# Altium footprint library MY_LIB_Connectors.PcbLib: 358 footprints (part 18 of 23)
Each footprint in its own frame and in the unit in brackets; x right, y up, seen from the top. Pads: shape width x height; smd on the part's side, far side on the other; paste and mask are expansions set on the pad; w line width, h text height; cw(c..) or ccw(c..) is an arc to the next point about the centre after c.
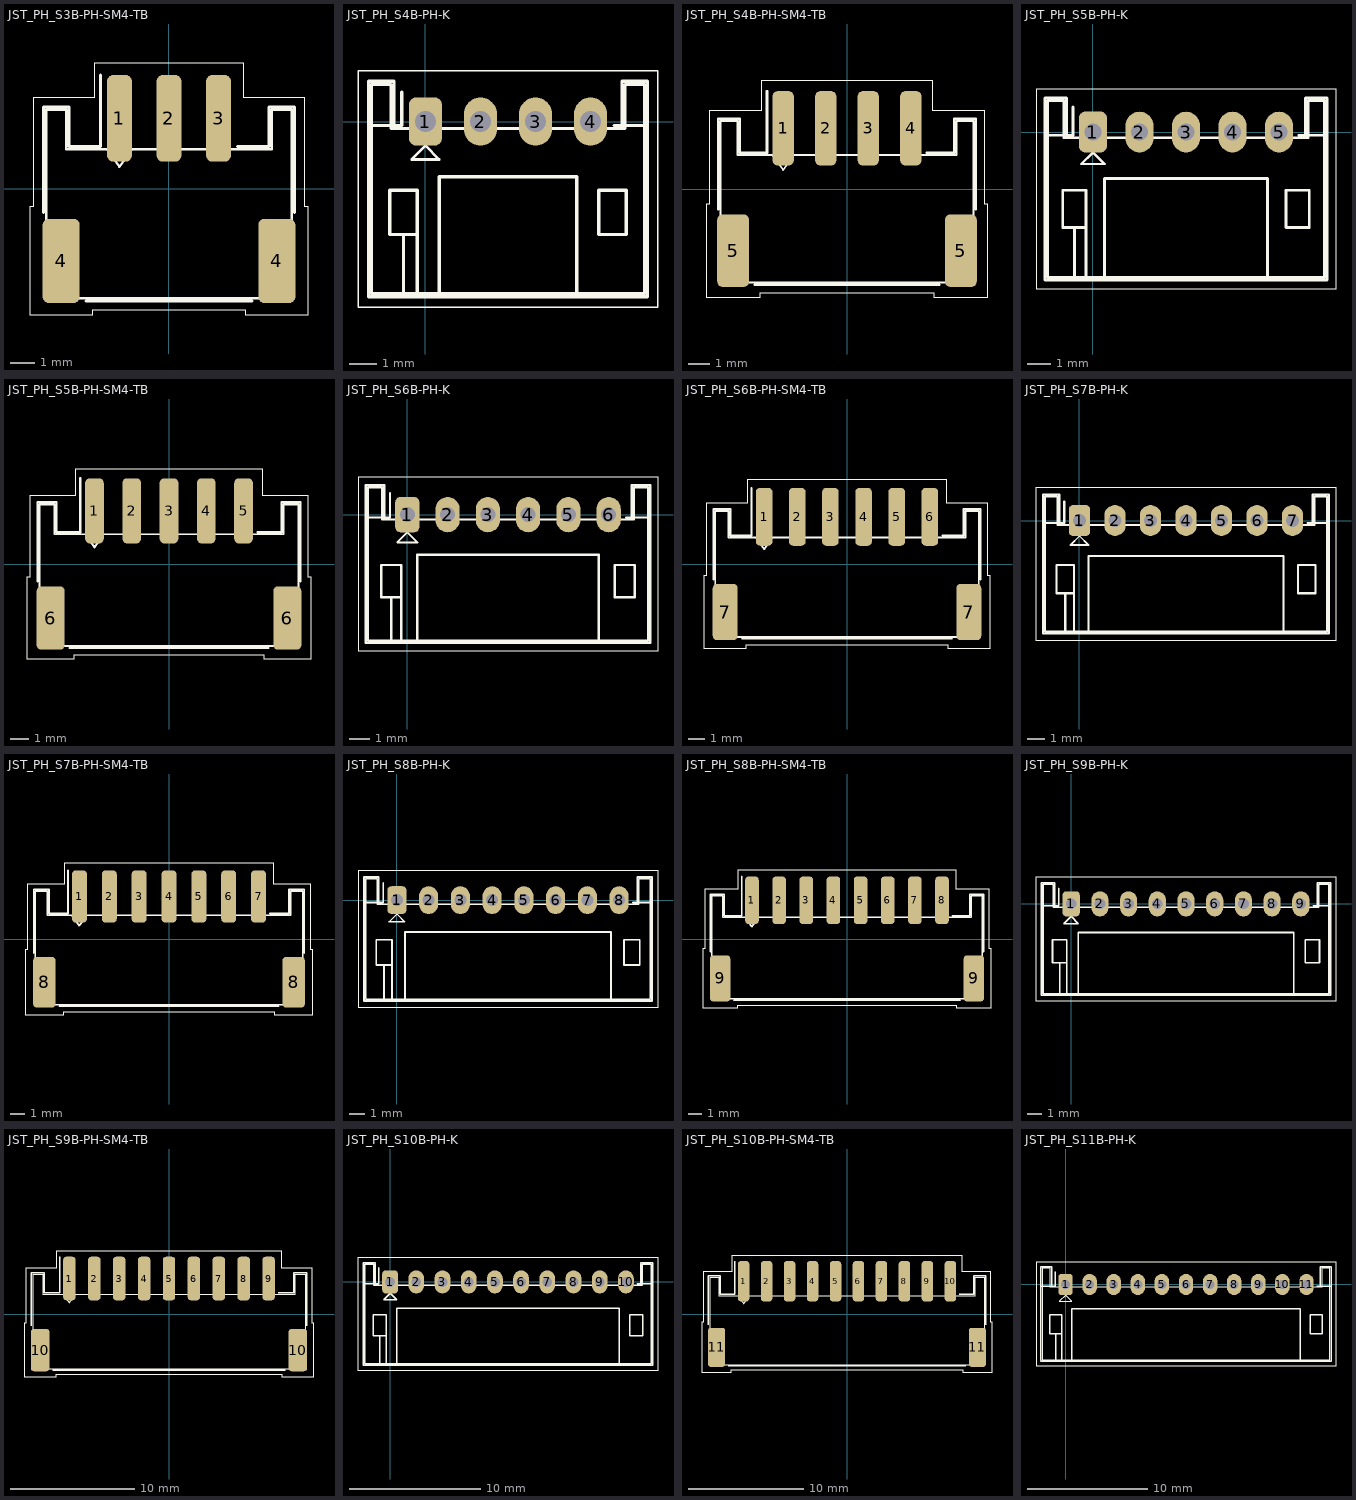
[diagram p17: the footprints below, top view; thin cyan lines are the x and y axes]

## JST_PH_S3B-PH-SM4-TB [mm] "JST S3B-PH-SM4-TB; reviewed KiCad footprint; ready STEP reference model"
height 5.588
pads (5):
  rrect50% 1x3.5 all layers, no hole: 1(-2,2.85) 2(0,2.85) 3(2,2.85)
  rrect33% 1.5x3.4 all layers, no hole: 4(-4.35,-2.9) 4(4.35,-2.9)
Top Overlay:
  lines w0.05: -5.6,-5.1 -5.6,-0.69 -5.45,-0.69 -5.45,3.7 -3,3.7 -3,5.1 3,5.1 3,3.7 5.45,3.7 5.45,-0.69 5.6,-0.69 5.6,-5.1 3.09,-5.1 3.09,-4.9 -3.09,-4.9 -3.09,-5.1 -5.6,-5.1
  lines w0.1: -2.5,1.6 -2,0.893 -1.5,1.6 ; -4.95,-4.4 -4.95,3.2 -4.15,3.2 -4.15,1.6 4.15,1.6 4.15,3.2 4.95,3.2 4.95,-4.4 -4.95,-4.4
  lines w0.12: -5.06,-0.94 -5.06,3.31 -4.04,3.31 -4.04,1.71 -2.76,1.71 -2.76,4.6 ; -3.34,-4.51 3.34,-4.51 ; 2.76,1.71 4.04,1.71 4.04,3.31 5.06,3.31 5.06,-0.94
3D body "s3b-ph-sm4-tb.step": height 5.59, standoff 0, extent -4.95,-4.4 4.95,3.2

## JST_PH_S4B-PH-K [mm] "JST S4B-PH-K; reviewed KiCad footprint; ready STEP reference model"
height 4.85
pads (4):
  rrect42% 1.2x1.75 hole 0.75: 1(0,0)
  oval 1.2x1.75 hole 0.75: 2(2,0) 3(4,0) 4(6,0)
Top Overlay:
  lines w0.05: -2.45,-6.75 -2.45,1.85 8.45,1.85 8.45,-6.75 -2.45,-6.75
  lines w0.1: -1.95,-6.25 -1.95,1.35 -1.25,1.35 -1.25,-0.25 7.25,-0.25 7.25,1.35 7.95,1.35 7.95,-6.25 -1.95,-6.25 ; -0.5,-1.375 0.5,-1.375 0,-0.875 -0.5,-1.375
  lines w0.12: -2.06,-0.14 -1.14,-0.14 ; -0.86,1.075 -0.86,-0.14 -1.14,-0.14 ; -0.8,-6.36 -0.8,-4.1 ; -0.3,-6.36 -0.3,-4.1 ; 0.5,-6.36 0.5,-2 5.5,-2 5.5,-6.36 ; 6.86,-0.14 7.14,-0.14 ; 8.06,-0.14 7.14,-0.14 ; -1.14,-0.14 -1.14,1.46 -2.06,1.46 -2.06,-6.36 8.06,-6.36 8.06,1.46 7.14,1.46 7.14,-0.14 ; -0.3,-4.1 -1.3,-4.1 -1.3,-2.5 -0.3,-2.5 -0.3,-4.1 ; 6.3,-4.1 6.3,-2.5 7.3,-2.5 7.3,-4.1 6.3,-4.1
3D body "JST_PH_S4B-PH-K_1x04_P2.00mm_Horizontal.step": height 4.85, standoff -3.4, extent -1.95,-6.25 7.95,1.35

## JST_PH_S4B-PH-SM4-TB [mm] "JST S4B-PH-SM4-TB; reviewed KiCad footprint; ready STEP reference model"
height 5.588
pads (6):
  rrect50% 1x3.5 all layers, no hole: 1(-3,2.85) 2(-1,2.85) 3(1,2.85) 4(3,2.85)
  rrect33% 1.5x3.4 all layers, no hole: 5(-5.35,-2.9) 5(5.35,-2.9)
Top Overlay:
  lines w0.05: -6.6,-5.1 -6.6,-0.69 -6.45,-0.69 -6.45,3.7 -4,3.7 -4,5.1 4,5.1 4,3.7 6.45,3.7 6.45,-0.69 6.6,-0.69 6.6,-5.1 4.09,-5.1 4.09,-4.9 -4.09,-4.9 -4.09,-5.1 -6.6,-5.1
  lines w0.1: -3.5,1.6 -3,0.893 -2.5,1.6 ; -5.95,-4.4 -5.95,3.2 -5.15,3.2 -5.15,1.6 5.15,1.6 5.15,3.2 5.95,3.2 5.95,-4.4 -5.95,-4.4
  lines w0.12: -6.06,-0.94 -6.06,3.31 -5.04,3.31 -5.04,1.71 -3.76,1.71 -3.76,4.6 ; -4.34,-4.51 4.34,-4.51 ; 3.76,1.71 5.04,1.71 5.04,3.31 6.06,3.31 6.06,-0.94
3D body "s4b-ph-sm4-tb.step": height 5.59, standoff 0, extent -5.95,-4.4 5.95,3.2

## JST_PH_S5B-PH-K [mm] "JST S5B-PH-K; reviewed KiCad footprint; ready STEP reference model"
height 4.85
pads (5):
  rrect42% 1.2x1.75 hole 0.75: 1(0,0)
  oval 1.2x1.75 hole 0.75: 2(2,0) 3(4,0) 4(6,0) 5(8,0)
Top Overlay:
  lines w0.05: -2.45,-6.75 -2.45,1.85 10.45,1.85 10.45,-6.75 -2.45,-6.75
  lines w0.1: -1.95,-6.25 -1.95,1.35 -1.25,1.35 -1.25,-0.25 9.25,-0.25 9.25,1.35 9.95,1.35 9.95,-6.25 -1.95,-6.25 ; -0.5,-1.375 0.5,-1.375 0,-0.875 -0.5,-1.375
  lines w0.12: -2.06,-0.14 -1.14,-0.14 ; -0.86,1.075 -0.86,-0.14 -1.14,-0.14 ; -0.8,-6.36 -0.8,-4.1 ; -0.3,-6.36 -0.3,-4.1 ; 0.5,-6.36 0.5,-2 7.5,-2 7.5,-6.36 ; 8.86,-0.14 9.14,-0.14 ; 10.06,-0.14 9.14,-0.14 ; -1.14,-0.14 -1.14,1.46 -2.06,1.46 -2.06,-6.36 10.06,-6.36 10.06,1.46 9.14,1.46 9.14,-0.14 ; -0.3,-4.1 -1.3,-4.1 -1.3,-2.5 -0.3,-2.5 -0.3,-4.1 ; 8.3,-4.1 8.3,-2.5 9.3,-2.5 9.3,-4.1 8.3,-4.1
3D body "JST_PH_S5B-PH-K_1x05_P2.00mm_Horizontal.step": height 4.85, standoff -3.4, extent -1.95,-6.25 9.95,1.35

## JST_PH_S5B-PH-SM4-TB [mm] "JST S5B-PH-SM4-TB; reviewed KiCad footprint; ready STEP reference model"
height 5.588
pads (7):
  rrect50% 1x3.5 all layers, no hole: 1(-4,2.85) 2(-2,2.85) 3(0,2.85) 4(2,2.85) 5(4,2.85)
  rrect33% 1.5x3.4 all layers, no hole: 6(-6.35,-2.9) 6(6.35,-2.9)
Top Overlay:
  lines w0.05: -7.6,-5.1 -7.6,-0.69 -7.45,-0.69 -7.45,3.7 -5,3.7 -5,5.1 5,5.1 5,3.7 7.45,3.7 7.45,-0.69 7.6,-0.69 7.6,-5.1 5.1,-5.1 5.1,-4.9 -5.1,-4.9 -5.1,-5.1 -7.6,-5.1
  lines w0.1: -4.5,1.6 -4,0.893 -3.5,1.6 ; -6.95,-4.4 -6.95,3.2 -6.15,3.2 -6.15,1.6 6.15,1.6 6.15,3.2 6.95,3.2 6.95,-4.4 -6.95,-4.4
  lines w0.12: -7.06,-0.94 -7.06,3.31 -6.04,3.31 -6.04,1.71 -4.76,1.71 -4.76,4.6 ; -5.34,-4.51 5.34,-4.51 ; 4.76,1.71 6.04,1.71 6.04,3.31 7.06,3.31 7.06,-0.94
3D body "s5b-ph-sm4-tb.step": height 5.59, standoff 0, extent -6.95,-4.4 6.95,3.2

## JST_PH_S6B-PH-K [mm] "JST S6B-PH-K; reviewed KiCad footprint; ready STEP reference model"
height 4.85
pads (6):
  rrect42% 1.2x1.75 hole 0.75: 1(0,0)
  oval 1.2x1.75 hole 0.75: 2(2,0) 3(4,0) 4(6,0) 5(8,0) 6(10,0)
Top Overlay:
  lines w0.05: -2.45,-6.75 -2.45,1.85 12.45,1.85 12.45,-6.75 -2.45,-6.75
  lines w0.1: -1.95,-6.25 -1.95,1.35 -1.25,1.35 -1.25,-0.25 11.25,-0.25 11.25,1.35 11.95,1.35 11.95,-6.25 -1.95,-6.25 ; -0.5,-1.375 0.5,-1.375 0,-0.875 -0.5,-1.375
  lines w0.12: -2.06,-0.14 -1.14,-0.14 ; -0.86,1.075 -0.86,-0.14 -1.14,-0.14 ; -0.8,-6.36 -0.8,-4.1 ; -0.3,-6.36 -0.3,-4.1 ; 0.5,-6.36 0.5,-2 9.5,-2 9.5,-6.36 ; 10.86,-0.14 11.14,-0.14 ; 12.06,-0.14 11.14,-0.14 ; -1.14,-0.14 -1.14,1.46 -2.06,1.46 -2.06,-6.36 12.06,-6.36 12.06,1.46 11.14,1.46 11.14,-0.14 ; -0.3,-4.1 -1.3,-4.1 -1.3,-2.5 -0.3,-2.5 -0.3,-4.1 ; 10.3,-4.1 10.3,-2.5 11.3,-2.5 11.3,-4.1 10.3,-4.1
3D body "JST_PH_S6B-PH-K_1x06_P2.00mm_Horizontal.step": height 4.85, standoff -3.4, extent -1.95,-6.25 11.95,1.35

## JST_PH_S6B-PH-SM4-TB [mm] "JST S6B-PH-SM4-TB; reviewed KiCad footprint; ready STEP reference model"
height 5.588
pads (8):
  rrect50% 1x3.5 all layers, no hole: 1(-5,2.85) 2(-3,2.85) 3(-1,2.85) 4(1,2.85) 5(3,2.85) 6(5,2.85)
  rrect33% 1.5x3.4 all layers, no hole: 7(-7.35,-2.9) 7(7.35,-2.9)
Top Overlay:
  lines w0.05: -8.6,-5.1 -8.6,-0.69 -8.45,-0.69 -8.45,3.7 -6,3.7 -6,5.1 6,5.1 6,3.7 8.45,3.7 8.45,-0.69 8.6,-0.69 8.6,-5.1 6.1,-5.1 6.1,-4.9 -6.1,-4.9 -6.1,-5.1 -8.6,-5.1
  lines w0.1: -5.5,1.6 -5,0.893 -4.5,1.6 ; -7.95,-4.4 -7.95,3.2 -7.15,3.2 -7.15,1.6 7.15,1.6 7.15,3.2 7.95,3.2 7.95,-4.4 -7.95,-4.4
  lines w0.12: -8.06,-0.94 -8.06,3.31 -7.04,3.31 -7.04,1.71 -5.76,1.71 -5.76,4.6 ; -6.34,-4.51 6.34,-4.51 ; 5.76,1.71 7.04,1.71 7.04,3.31 8.06,3.31 8.06,-0.94
3D body "s6b-ph-sm4-tb.step": height 5.59, standoff 0, extent -7.95,-4.4 7.95,3.2

## JST_PH_S7B-PH-K [mm] "JST S7B-PH-K; reviewed KiCad footprint; ready STEP reference model"
height 4.85
pads (7):
  rrect42% 1.2x1.75 hole 0.75: 1(0,0)
  oval 1.2x1.75 hole 0.75: 2(2,0) 3(4,0) 4(6,0) 5(8,0) 6(10,0) 7(12,0)
Top Overlay:
  lines w0.05: -2.45,-6.75 -2.45,1.85 14.45,1.85 14.45,-6.75 -2.45,-6.75
  lines w0.1: -1.95,-6.25 -1.95,1.35 -1.25,1.35 -1.25,-0.25 13.25,-0.25 13.25,1.35 13.95,1.35 13.95,-6.25 -1.95,-6.25 ; -0.5,-1.375 0.5,-1.375 0,-0.875 -0.5,-1.375
  lines w0.12: -2.06,-0.14 -1.14,-0.14 ; -0.86,1.075 -0.86,-0.14 -1.14,-0.14 ; -0.8,-6.36 -0.8,-4.1 ; -0.3,-6.36 -0.3,-4.1 ; 0.5,-6.36 0.5,-2 11.5,-2 11.5,-6.36 ; 12.86,-0.14 13.14,-0.14 ; 14.06,-0.14 13.14,-0.14 ; -1.14,-0.14 -1.14,1.46 -2.06,1.46 -2.06,-6.36 14.06,-6.36 14.06,1.46 13.14,1.46 13.14,-0.14 ; -0.3,-4.1 -1.3,-4.1 -1.3,-2.5 -0.3,-2.5 -0.3,-4.1 ; 12.3,-4.1 12.3,-2.5 13.3,-2.5 13.3,-4.1 12.3,-4.1
3D body "JST_PH_S7B-PH-K_1x07_P2.00mm_Horizontal.step": height 4.85, standoff -3.4, extent -1.95,-6.25 13.95,1.35

## JST_PH_S7B-PH-SM4-TB [mm] "JST S7B-PH-SM4-TB; reviewed KiCad footprint; ready STEP reference model"
height 5.588
pads (9):
  rrect50% 1x3.5 all layers, no hole: 1(-6,2.85) 2(-4,2.85) 3(-2,2.85) 4(0,2.85) 5(2,2.85) 6(4,2.85) 7(6,2.85)
  rrect33% 1.5x3.4 all layers, no hole: 8(-8.35,-2.9) 8(8.35,-2.9)
Top Overlay:
  lines w0.05: -9.6,-5.1 -9.6,-0.69 -9.45,-0.69 -9.45,3.7 -7,3.7 -7,5.1 7,5.1 7,3.7 9.45,3.7 9.45,-0.69 9.6,-0.69 9.6,-5.1 7.1,-5.1 7.1,-4.9 -7.1,-4.9 -7.1,-5.1 -9.6,-5.1
  lines w0.1: -6.5,1.6 -6,0.893 -5.5,1.6 ; -8.95,-4.4 -8.95,3.2 -8.15,3.2 -8.15,1.6 8.15,1.6 8.15,3.2 8.95,3.2 8.95,-4.4 -8.95,-4.4
  lines w0.12: -9.06,-0.94 -9.06,3.31 -8.04,3.31 -8.04,1.71 -6.76,1.71 -6.76,4.6 ; -7.34,-4.51 7.34,-4.51 ; 6.76,1.71 8.04,1.71 8.04,3.31 9.06,3.31 9.06,-0.94
3D body "s7b-ph-sm4-tb.step": height 5.59, standoff 0, extent -8.95,-4.4 8.95,3.2

## JST_PH_S8B-PH-K [mm] "JST S8B-PH-K; reviewed KiCad footprint; ready STEP reference model"
height 4.85
pads (8):
  rrect42% 1.2x1.75 hole 0.75: 1(0,0)
  oval 1.2x1.75 hole 0.75: 2(2,0) 3(4,0) 4(6,0) 5(8,0) 6(10,0) 7(12,0) 8(14,0)
Top Overlay:
  lines w0.05: -2.45,-6.75 -2.45,1.85 16.45,1.85 16.45,-6.75 -2.45,-6.75
  lines w0.1: -1.95,-6.25 -1.95,1.35 -1.25,1.35 -1.25,-0.25 15.25,-0.25 15.25,1.35 15.95,1.35 15.95,-6.25 -1.95,-6.25 ; -0.5,-1.375 0.5,-1.375 0,-0.875 -0.5,-1.375
  lines w0.12: -2.06,-0.14 -1.14,-0.14 ; -0.86,1.075 -0.86,-0.14 -1.14,-0.14 ; -0.8,-6.36 -0.8,-4.1 ; -0.3,-6.36 -0.3,-4.1 ; 0.5,-6.36 0.5,-2 13.5,-2 13.5,-6.36 ; 14.86,-0.14 15.14,-0.14 ; 16.06,-0.14 15.14,-0.14 ; -1.14,-0.14 -1.14,1.46 -2.06,1.46 -2.06,-6.36 16.06,-6.36 16.06,1.46 15.14,1.46 15.14,-0.14 ; -0.3,-4.1 -1.3,-4.1 -1.3,-2.5 -0.3,-2.5 -0.3,-4.1 ; 14.3,-4.1 14.3,-2.5 15.3,-2.5 15.3,-4.1 14.3,-4.1
3D body "JST_PH_S8B-PH-K_1x08_P2.00mm_Horizontal.step": height 4.85, standoff -3.4, extent -1.95,-6.25 15.95,1.35

## JST_PH_S8B-PH-SM4-TB [mm] "JST S8B-PH-SM4-TB; reviewed KiCad footprint; ready STEP reference model"
height 5.588
pads (10):
  rrect50% 1x3.5 all layers, no hole: 1(-7,2.85) 2(-5,2.85) 3(-3,2.85) 4(-1,2.85) 5(1,2.85) 6(3,2.85) 7(5,2.85) 8(7,2.85)
  rrect33% 1.5x3.4 all layers, no hole: 9(-9.35,-2.9) 9(9.35,-2.9)
Top Overlay:
  lines w0.05: -10.6,-5.1 -10.6,-0.69 -10.45,-0.69 -10.45,3.7 -8,3.7 -8,5.1 8,5.1 8,3.7 10.45,3.7 10.45,-0.69 10.6,-0.69 10.6,-5.1 8.1,-5.1 8.1,-4.9 -8.1,-4.9 -8.1,-5.1 -10.6,-5.1
  lines w0.1: -7.5,1.6 -7,0.893 -6.5,1.6 ; -9.95,-4.4 -9.95,3.2 -9.15,3.2 -9.15,1.6 9.15,1.6 9.15,3.2 9.95,3.2 9.95,-4.4 -9.95,-4.4
  lines w0.12: -10.06,-0.94 -10.06,3.31 -9.04,3.31 -9.04,1.71 -7.76,1.71 -7.76,4.6 ; -8.34,-4.51 8.34,-4.51 ; 7.76,1.71 9.04,1.71 9.04,3.31 10.06,3.31 10.06,-0.94
3D body "s8b-ph-sm4-tb.step": height 5.59, standoff 0, extent -9.95,-4.4 9.95,3.2

## JST_PH_S9B-PH-K [mm] "JST S9B-PH-K; reviewed KiCad footprint; ready STEP reference model"
height 4.85
pads (9):
  rrect42% 1.2x1.75 hole 0.75: 1(0,0)
  oval 1.2x1.75 hole 0.75: 2(2,0) 3(4,0) 4(6,0) 5(8,0) 6(10,0) 7(12,0) 8(14,0) 9(16,0)
Top Overlay:
  lines w0.05: -2.45,-6.75 -2.45,1.85 18.45,1.85 18.45,-6.75 -2.45,-6.75
  lines w0.1: -1.95,-6.25 -1.95,1.35 -1.25,1.35 -1.25,-0.25 17.25,-0.25 17.25,1.35 17.95,1.35 17.95,-6.25 -1.95,-6.25 ; -0.5,-1.375 0.5,-1.375 0,-0.875 -0.5,-1.375
  lines w0.12: -2.06,-0.14 -1.14,-0.14 ; -0.86,1.075 -0.86,-0.14 -1.14,-0.14 ; -0.8,-6.36 -0.8,-4.1 ; -0.3,-6.36 -0.3,-4.1 ; 0.5,-6.36 0.5,-2 15.5,-2 15.5,-6.36 ; 16.86,-0.14 17.14,-0.14 ; 18.06,-0.14 17.14,-0.14 ; -1.14,-0.14 -1.14,1.46 -2.06,1.46 -2.06,-6.36 18.06,-6.36 18.06,1.46 17.14,1.46 17.14,-0.14 ; -0.3,-4.1 -1.3,-4.1 -1.3,-2.5 -0.3,-2.5 -0.3,-4.1 ; 16.3,-4.1 16.3,-2.5 17.3,-2.5 17.3,-4.1 16.3,-4.1
3D body "JST_PH_S9B-PH-K_1x09_P2.00mm_Horizontal.step": height 4.85, standoff -3.4, extent -1.95,-6.25 17.95,1.35

## JST_PH_S9B-PH-SM4-TB [mm] "JST S9B-PH-SM4-TB; reviewed KiCad footprint; ready STEP reference model"
height 5.588
pads (11):
  rrect50% 1x3.5 all layers, no hole: 1(-8,2.85) 2(-6,2.85) 3(-4,2.85) 4(-2,2.85) 5(0,2.85) 6(2,2.85) 7(4,2.85) 8(6,2.85) 9(8,2.85)
  rrect33% 1.5x3.4 all layers, no hole: 10(-10.35,-2.9) 10(10.35,-2.9)
Top Overlay:
  lines w0.05: -11.6,-5.1 -11.6,-0.69 -11.45,-0.69 -11.45,3.7 -9,3.7 -9,5.1 9,5.1 9,3.7 11.45,3.7 11.45,-0.69 11.6,-0.69 11.6,-5.1 9.1,-5.1 9.1,-4.9 -9.1,-4.9 -9.1,-5.1 -11.6,-5.1
  lines w0.1: -8.5,1.6 -8,0.893 -7.5,1.6 ; -10.95,-4.4 -10.95,3.2 -10.15,3.2 -10.15,1.6 10.15,1.6 10.15,3.2 10.95,3.2 10.95,-4.4 -10.95,-4.4
  lines w0.12: -11.06,-0.94 -11.06,3.31 -10.04,3.31 -10.04,1.71 -8.76,1.71 -8.76,4.6 ; -9.34,-4.51 9.34,-4.51 ; 8.76,1.71 10.04,1.71 10.04,3.31 11.06,3.31 11.06,-0.94
3D body "s9b-ph-sm4-tb.step": height 5.59, standoff 0, extent -10.95,-4.4 10.95,3.2

## JST_PH_S10B-PH-K [mm] "JST S10B-PH-K; reviewed KiCad footprint; ready STEP reference model"
height 4.85
pads (10):
  rrect42% 1.2x1.75 hole 0.75: 1(0,0)
  oval 1.2x1.75 hole 0.75: 2(2,0) 3(4,0) 4(6,0) 5(8,0) 6(10,0) 7(12,0) 8(14,0) 9(16,0) 10(18,0)
Top Overlay:
  lines w0.05: -2.45,-6.75 -2.45,1.85 20.45,1.85 20.45,-6.75 -2.45,-6.75
  lines w0.1: -1.95,-6.25 -1.95,1.35 -1.25,1.35 -1.25,-0.25 19.25,-0.25 19.25,1.35 19.95,1.35 19.95,-6.25 -1.95,-6.25 ; -0.5,-1.375 0.5,-1.375 0,-0.875 -0.5,-1.375
  lines w0.12: -2.06,-0.14 -1.14,-0.14 ; -0.86,1.075 -0.86,-0.14 -1.14,-0.14 ; -0.8,-6.36 -0.8,-4.1 ; -0.3,-6.36 -0.3,-4.1 ; 0.5,-6.36 0.5,-2 17.5,-2 17.5,-6.36 ; 18.86,-0.14 19.14,-0.14 ; 20.06,-0.14 19.14,-0.14 ; -1.14,-0.14 -1.14,1.46 -2.06,1.46 -2.06,-6.36 20.06,-6.36 20.06,1.46 19.14,1.46 19.14,-0.14 ; -0.3,-4.1 -1.3,-4.1 -1.3,-2.5 -0.3,-2.5 -0.3,-4.1 ; 18.3,-4.1 18.3,-2.5 19.3,-2.5 19.3,-4.1 18.3,-4.1
3D body "JST_PH_S10B-PH-K_1x10_P2.00mm_Horizontal.step": height 4.85, standoff -3.4, extent -1.95,-6.25 19.95,1.35

## JST_PH_S10B-PH-SM4-TB [mm] "JST S10B-PH-SM4-TB; reviewed KiCad footprint; ready STEP reference model"
height 5.588
pads (12):
  rrect50% 1x3.5 all layers, no hole: 1(-9,2.85) 2(-7,2.85) 3(-5,2.85) 4(-3,2.85) 5(-1,2.85) 6(1,2.85) 7(3,2.85) 8(5,2.85) 9(7,2.85) 10(9,2.85)
  rrect33% 1.5x3.4 all layers, no hole: 11(-11.35,-2.9) 11(11.35,-2.9)
Top Overlay:
  lines w0.05: -12.6,-5.1 -12.6,-0.69 -12.45,-0.69 -12.45,3.7 -10,3.7 -10,5.1 10,5.1 10,3.7 12.45,3.7 12.45,-0.69 12.6,-0.69 12.6,-5.1 10.1,-5.1 10.1,-4.9 -10.1,-4.9 -10.1,-5.1 -12.6,-5.1
  lines w0.1: -9.5,1.6 -9,0.893 -8.5,1.6 ; -11.95,-4.4 -11.95,3.2 -11.15,3.2 -11.15,1.6 11.15,1.6 11.15,3.2 11.95,3.2 11.95,-4.4 -11.95,-4.4
  lines w0.12: -12.06,-0.94 -12.06,3.31 -11.04,3.31 -11.04,1.71 -9.76,1.71 -9.76,4.6 ; -10.34,-4.51 10.34,-4.51 ; 9.76,1.71 11.04,1.71 11.04,3.31 12.06,3.31 12.06,-0.94
3D body "s10b-ph-sm4-tb.step": height 5.59, standoff 0, extent -11.95,-4.4 11.95,3.2

## JST_PH_S11B-PH-K [mm] "JST S11B-PH-K; reviewed KiCad footprint; ready STEP reference model"
height 4.85
pads (11):
  rrect42% 1.2x1.75 hole 0.75: 1(0,0)
  oval 1.2x1.75 hole 0.75: 2(2,0) 3(4,0) 4(6,0) 5(8,0) 6(10,0) 7(12,0) 8(14,0) 9(16,0) 10(18,0) 11(20,0)
Top Overlay:
  lines w0.05: -2.45,-6.75 -2.45,1.85 22.45,1.85 22.45,-6.75 -2.45,-6.75
  lines w0.1: -1.95,-6.25 -1.95,1.35 -1.25,1.35 -1.25,-0.25 21.25,-0.25 21.25,1.35 21.95,1.35 21.95,-6.25 -1.95,-6.25 ; -0.5,-1.375 0.5,-1.375 0,-0.875 -0.5,-1.375
  lines w0.12: -2.06,-0.14 -1.14,-0.14 ; -0.86,1.075 -0.86,-0.14 -1.14,-0.14 ; -0.8,-6.36 -0.8,-4.1 ; -0.3,-6.36 -0.3,-4.1 ; 0.5,-6.36 0.5,-2 19.5,-2 19.5,-6.36 ; 20.86,-0.14 21.14,-0.14 ; 22.06,-0.14 21.14,-0.14 ; -1.14,-0.14 -1.14,1.46 -2.06,1.46 -2.06,-6.36 22.06,-6.36 22.06,1.46 21.14,1.46 21.14,-0.14 ; -0.3,-4.1 -1.3,-4.1 -1.3,-2.5 -0.3,-2.5 -0.3,-4.1 ; 20.3,-4.1 20.3,-2.5 21.3,-2.5 21.3,-4.1 20.3,-4.1
3D body "JST_PH_S11B-PH-K_1x11_P2.00mm_Horizontal.step": height 4.85, standoff -3.4, extent -1.95,-6.25 21.95,1.35